# Altium footprint library 0805_5%_Resistor.PcbLib: 21 footprints (part 1 of 2)
Each footprint in its own frame and in the unit in brackets; x right, y up, seen from the top. Pads: shape width x height; smd on the part's side, far side on the other; paste and mask are expansions set on the pad; w line width, h text height; cw(c..) or ccw(c..) is an arc to the next point about the centre after c.
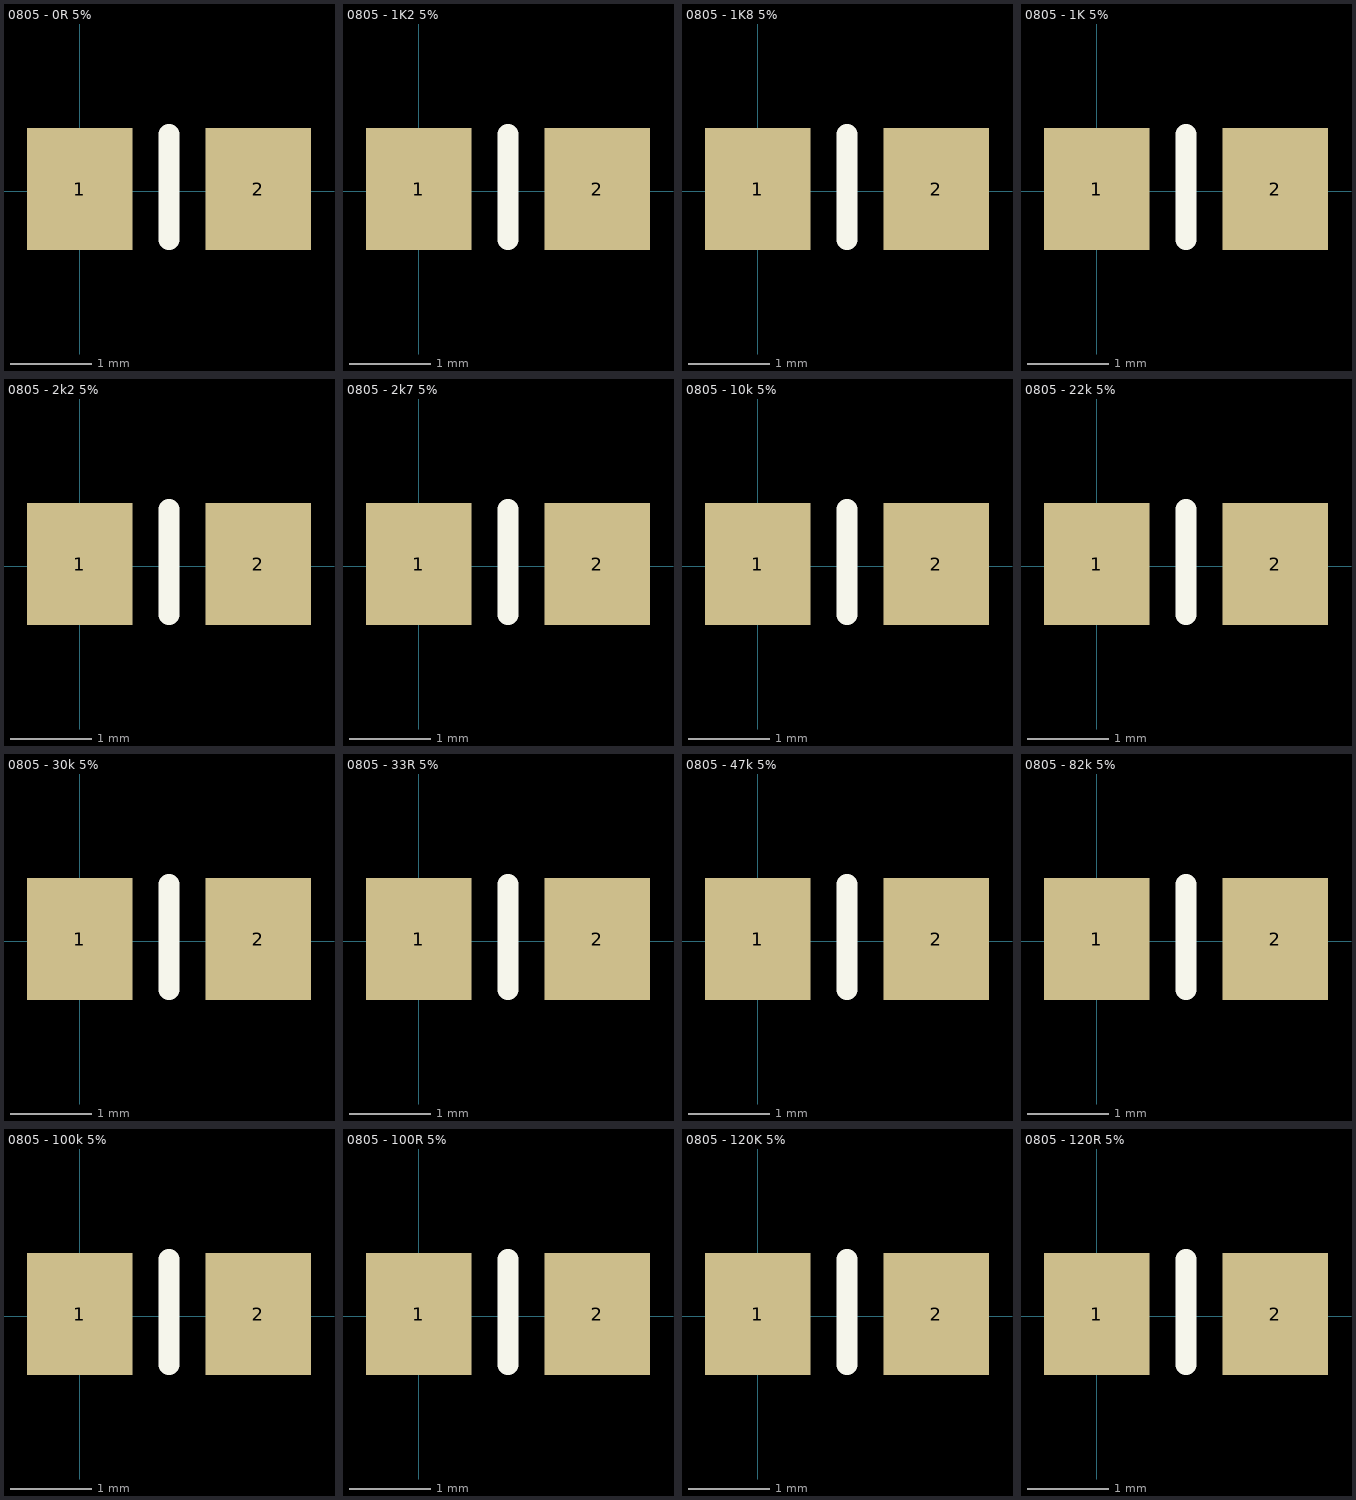
[diagram p0: the footprints below, top view; thin cyan lines are the x and y axes]

## 0805 - 0R 5% [mm]
pads (2):
  rect 1.3x1.5 smd: 1(0,0.025) 2(2.2,0.025)
Top Overlay:
  lines w0.254: 1.1,-0.6 1.1,0.7
3D body "0R.STEP": height 0.43, standoff -0.02, extent 0.125,-0.6 2.125,0.65

## 0805 - 1K2 5% [mm]
pads (2):
  rect 1.3x1.5 smd: 1(0,0.025) 2(2.2,0.025)
Top Overlay:
  lines w0.254: 1.1,-0.6 1.1,0.7
3D body "1k2 5%.STEP": height 0.43, standoff -0.02, extent 0.125,-0.6 2.125,0.65

## 0805 - 1K8 5% [mm]
pads (2):
  rect 1.3x1.5 smd: 1(0,0.025) 2(2.2,0.025)
Top Overlay:
  lines w0.254: 1.1,-0.6 1.1,0.7
3D body "1k8 5%.STEP": height 0.43, standoff -0.02, extent 0.125,-0.6 2.125,0.65

## 0805 - 1K 5% [mm]
pads (2):
  rect 1.3x1.5 smd: 1(0,0.025) 2(2.2,0.025)
Top Overlay:
  lines w0.254: 1.1,-0.6 1.1,0.7
3D body "1k 5%.STEP": height 0.43, standoff -0.02, extent 0.125,-0.6 2.125,0.65

## 0805 - 2k2 5% [mm]
pads (2):
  rect 1.3x1.5 smd: 1(0,0.025) 2(2.2,0.025)
Top Overlay:
  lines w0.254: 1.1,-0.6 1.1,0.7
3D body "2k2 5%.STEP": height 0.43, standoff -0.02, extent 0.125,-0.6 2.125,0.65

## 0805 - 2k7 5% [mm]
pads (2):
  rect 1.3x1.5 smd: 1(0,0.025) 2(2.2,0.025)
Top Overlay:
  lines w0.254: 1.1,-0.6 1.1,0.7
3D body "2k7 5%.STEP": height 0.43, standoff -0.02, extent 0.125,-0.6 2.125,0.65

## 0805 - 10k 5% [mm]
pads (2):
  rect 1.3x1.5 smd: 1(0,0.025) 2(2.2,0.025)
Top Overlay:
  lines w0.254: 1.1,-0.6 1.1,0.7
3D body "10k 5%.STEP": height 0.43, standoff -0.02, extent 0.125,-0.6 2.125,0.65

## 0805 - 22k 5% [mm]
pads (2):
  rect 1.3x1.5 smd: 1(0,0.025) 2(2.2,0.025)
Top Overlay:
  lines w0.254: 1.1,-0.6 1.1,0.7
3D body "22k 5%.STEP": height 0.43, standoff -0.02, extent 0.125,-0.6 2.125,0.65

## 0805 - 30k 5% [mm]
pads (2):
  rect 1.3x1.5 smd: 1(0,0.025) 2(2.2,0.025)
Top Overlay:
  lines w0.254: 1.1,-0.6 1.1,0.7
3D body "30k 5%.STEP": height 0.43, standoff -0.02, extent 0.125,-0.6 2.125,0.65

## 0805 - 33R 5% [mm]
pads (2):
  rect 1.3x1.5 smd: 1(0,0.025) 2(2.2,0.025)
Top Overlay:
  lines w0.254: 1.1,-0.6 1.1,0.7
3D body "33R 5%.STEP": height 0.43, standoff -0.02, extent 0.125,-0.6 2.125,0.65

## 0805 - 47k 5% [mm]
pads (2):
  rect 1.3x1.5 smd: 1(0,0.025) 2(2.2,0.025)
Top Overlay:
  lines w0.254: 1.1,-0.6 1.1,0.7
3D body "47k 5%.STEP": height 0.43, standoff -0.02, extent 0.125,-0.6 2.125,0.65

## 0805 - 82k 5% [mm]
pads (2):
  rect 1.3x1.5 smd: 1(0,0.025) 2(2.2,0.025)
Top Overlay:
  lines w0.254: 1.1,-0.6 1.1,0.7
3D body "82k 5%.STEP": height 0.43, standoff -0.02, extent 0.125,-0.6 2.125,0.65

## 0805 - 100k 5% [mm]
pads (2):
  rect 1.3x1.5 smd: 1(0,0.025) 2(2.2,0.025)
Top Overlay:
  lines w0.254: 1.1,-0.6 1.1,0.7
3D body "100k 5%.STEP": height 0.43, standoff -0.02, extent 0.125,-0.6 2.125,0.65

## 0805 - 100R 5% [mm]
pads (2):
  rect 1.3x1.5 smd: 1(0,0.025) 2(2.2,0.025)
Top Overlay:
  lines w0.254: 1.1,-0.6 1.1,0.7
3D body "100R 5%.STEP": height 0.43, standoff -0.02, extent 0.125,-0.6 2.125,0.65

## 0805 - 120K 5% [mm]
pads (2):
  rect 1.3x1.5 smd: 1(0,0.025) 2(2.2,0.025)
Top Overlay:
  lines w0.254: 1.1,-0.6 1.1,0.7
3D body "Resistor_120k.STEP": height 0.45, standoff 0, extent 0.175,-0.6 2.175,0.65

## 0805 - 120R 5% [mm]
pads (2):
  rect 1.3x1.5 smd: 1(0,0.025) 2(2.2,0.025)
Top Overlay:
  lines w0.254: 1.1,-0.6 1.1,0.7
3D body "120R 5%.STEP": height 0.43, standoff -0.02, extent 0.125,-0.6 2.125,0.65